# Altium footprint library Misc_custom.PcbLib: 14 footprints
Each footprint in its own frame and in the unit in brackets; x right, y up, seen from the top. Pads: shape width x height; smd on the part's side, far side on the other; paste and mask are expansions set on the pad; w line width, h text height; cw(c..) or ccw(c..) is an arc to the next point about the centre after c.
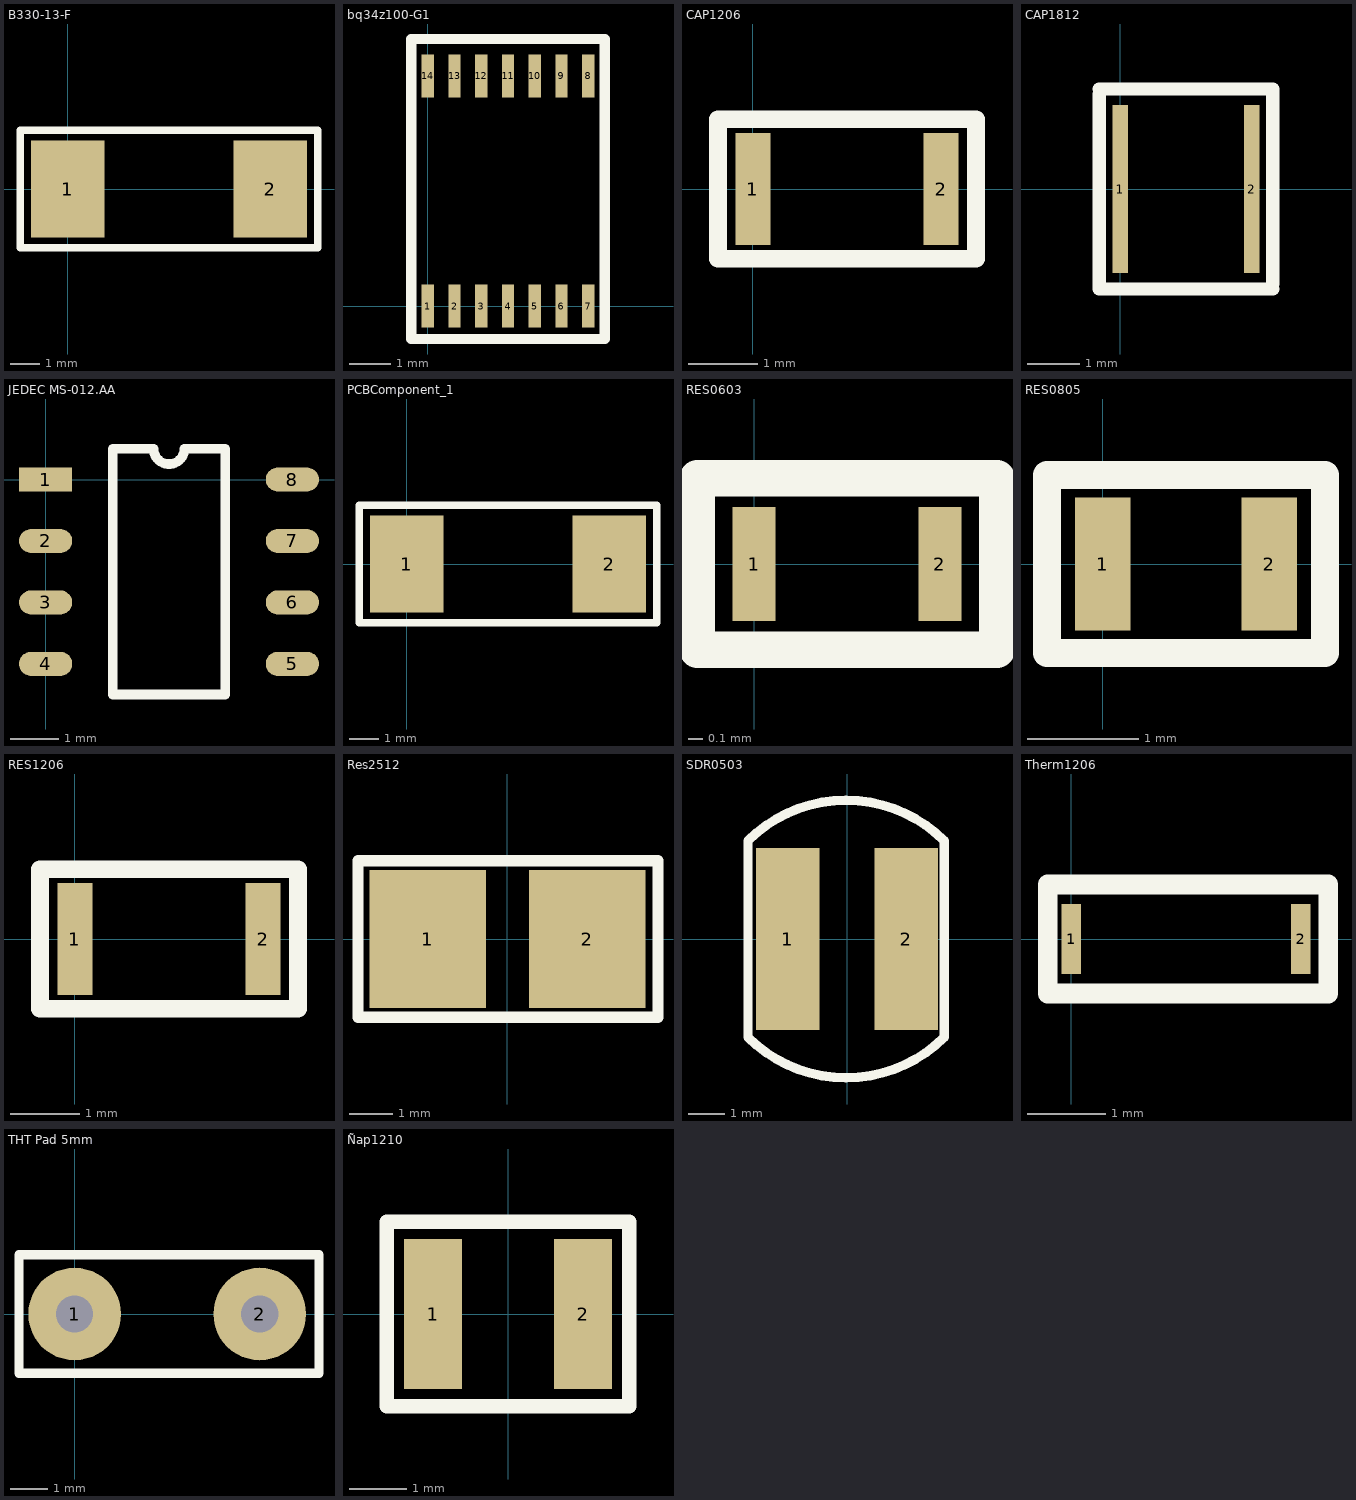
[diagram p0: the footprints below, top view; thin cyan lines are the x and y axes]

## B330-13-F [mm]
pads (2):
  rect 2.5x3.3 smd: 1(0,0) 2(6.9,0)
Top Overlay:
  lines w0.254: -1.6,-2 8.5,-2 8.5,2 -1.6,2 -1.6,-2

## bq34z100-G1 [mm]
pads (14):
  rect 0.3x1.05 smd: 1(0,0) 2(0.65,0) 3(1.3,0) 4(1.95,0) 5(2.6,0) 6(3.25,0) 7(3.9,0) 8(3.9,5.6) 9(3.25,5.6) 10(2.6,5.6) 11(1.95,5.6) 12(1.3,5.6) 13(0.65,5.6) 14(0,5.6)
Top Overlay:
  lines w0.254: -0.4,-0.8 4.3,-0.8 4.3,6.5 -0.4,6.5 -0.4,-0.8

## CAP1206 [mm]
pads (2):
  rect 0.5x1.6 smd: 1(0,0) 2(2.7,0)
Top Overlay:
  lines w0.254: -0.5,-1 -0.5,1 3.2,1 3.2,-1 -0.5,-1

## CAP1812 [mm]
pads (2):
  rect 0.3x3.2 smd: 1(0,0) 2(2.5,0)
Top Overlay:
  lines w0.254: -0.4,1.8 -0.4,-1.9 2.9,-1.9 ; -0.4,1.9 2.9,1.9 2.9,-1.8

## JEDEC MS-012.AA [mm]
pads (8):
  rect 1.1x0.5 smd: 1(0,0)
  oval 1.1x0.5 smd: 2(0,-1.27) 3(0,-2.54) 4(0,-3.81) 5(5.1,-3.81) 6(5.1,-2.54) 7(5.1,-1.27) 8(5.1,0)
Top Overlay:
  lines w0.2: 1.385,-4.445 1.385,0.635 2.232,0.635 ccw(c2.55,0.635) 2.867,0.635 3.715,0.635 3.715,-4.445 1.385,-4.445

## PCBComponent_1 [mm]
pads (2):
  rect 2.5x3.3 smd: 1(0,0) 2(6.9,0)
Top Overlay:
  lines w0.254: -1.6,-2 8.5,-2 8.5,2 -1.6,2 -1.6,-2

## RES0603 [mm]
pads (2):
  rect 0.3x0.8 smd: 1(0,0) 2(1.3,0)
Top Overlay:
  lines w0.254: -0.4,-0.6 -0.4,0.6 1.7,0.6 1.7,-0.6 -0.4,-0.6

## RES0805 [mm]
pads (2):
  rect 0.5x1.2 smd: 1(0,0) 2(1.5,0)
Top Overlay:
  lines w0.254: -0.5,-0.8 -0.5,0.8 2,0.8 2,-0.8 -0.5,-0.8

## RES1206 [mm]
pads (2):
  rect 0.5x1.6 smd: 1(0,0) 2(2.7,0)
Top Overlay:
  lines w0.254: -0.5,-1 -0.5,1 3.2,1 3.2,-1 -0.5,-1

## Res2512 [mm]
pads (2):
  rect 2.68x3.18 smd: 1(-1.835,0) 2(1.835,0)
Top Overlay:
  lines w0.254: -3.435,-1.8 -3.435,1.8 3.465,1.8 3.465,-1.8 -3.435,-1.8

## SDR0503 [mm]
pads (2):
  rect 1.75x5 smd: 1(-1.625,0) 2(1.625,0)
Top Overlay:
  lines w0.254: -2.725,-2.7 ccw(c-0.025,0) 2.675,-2.7 2.675,2.7 ccw(c-0.025,0) -2.725,2.7 -2.725,-2.7

## Therm1206 [mm]
pads (2):
  rect 0.25x0.9 smd: 1(0,0) 2(2.95,0)
Top Overlay:
  lines w0.254: -0.3,-0.7 -0.3,0.7 3.3,0.7 3.3,-0.7 -0.3,-0.7

## THT Pad 5mm [mm]
pads (2):
  round 2.5 hole 1: 1(0,0) 2(5,0)
Top Overlay:
  lines w0.254: -1.5,-1.6 -1.5,1.6 6.6,1.6 6.6,-1.6 -1.5,-1.6

## Ñap1210 [mm]
pads (2):
  rect 1x2.6 smd: 1(-1.3,0) 2(1.3,0)
Top Overlay:
  lines w0.254: -2.1,-1.6 2.1,-1.6 2.1,1.6 -2.1,1.6 -2.1,-1.6